# Altium footprint library PcbLib1.PcbLib: 75 footprints (part 4 of 5)
Each footprint in its own frame and in the unit in brackets; x right, y up, seen from the top. Pads: shape width x height; smd on the part's side, far side on the other; paste and mask are expansions set on the pad; w line width, h text height; cw(c..) or ccw(c..) is an arc to the next point about the centre after c.
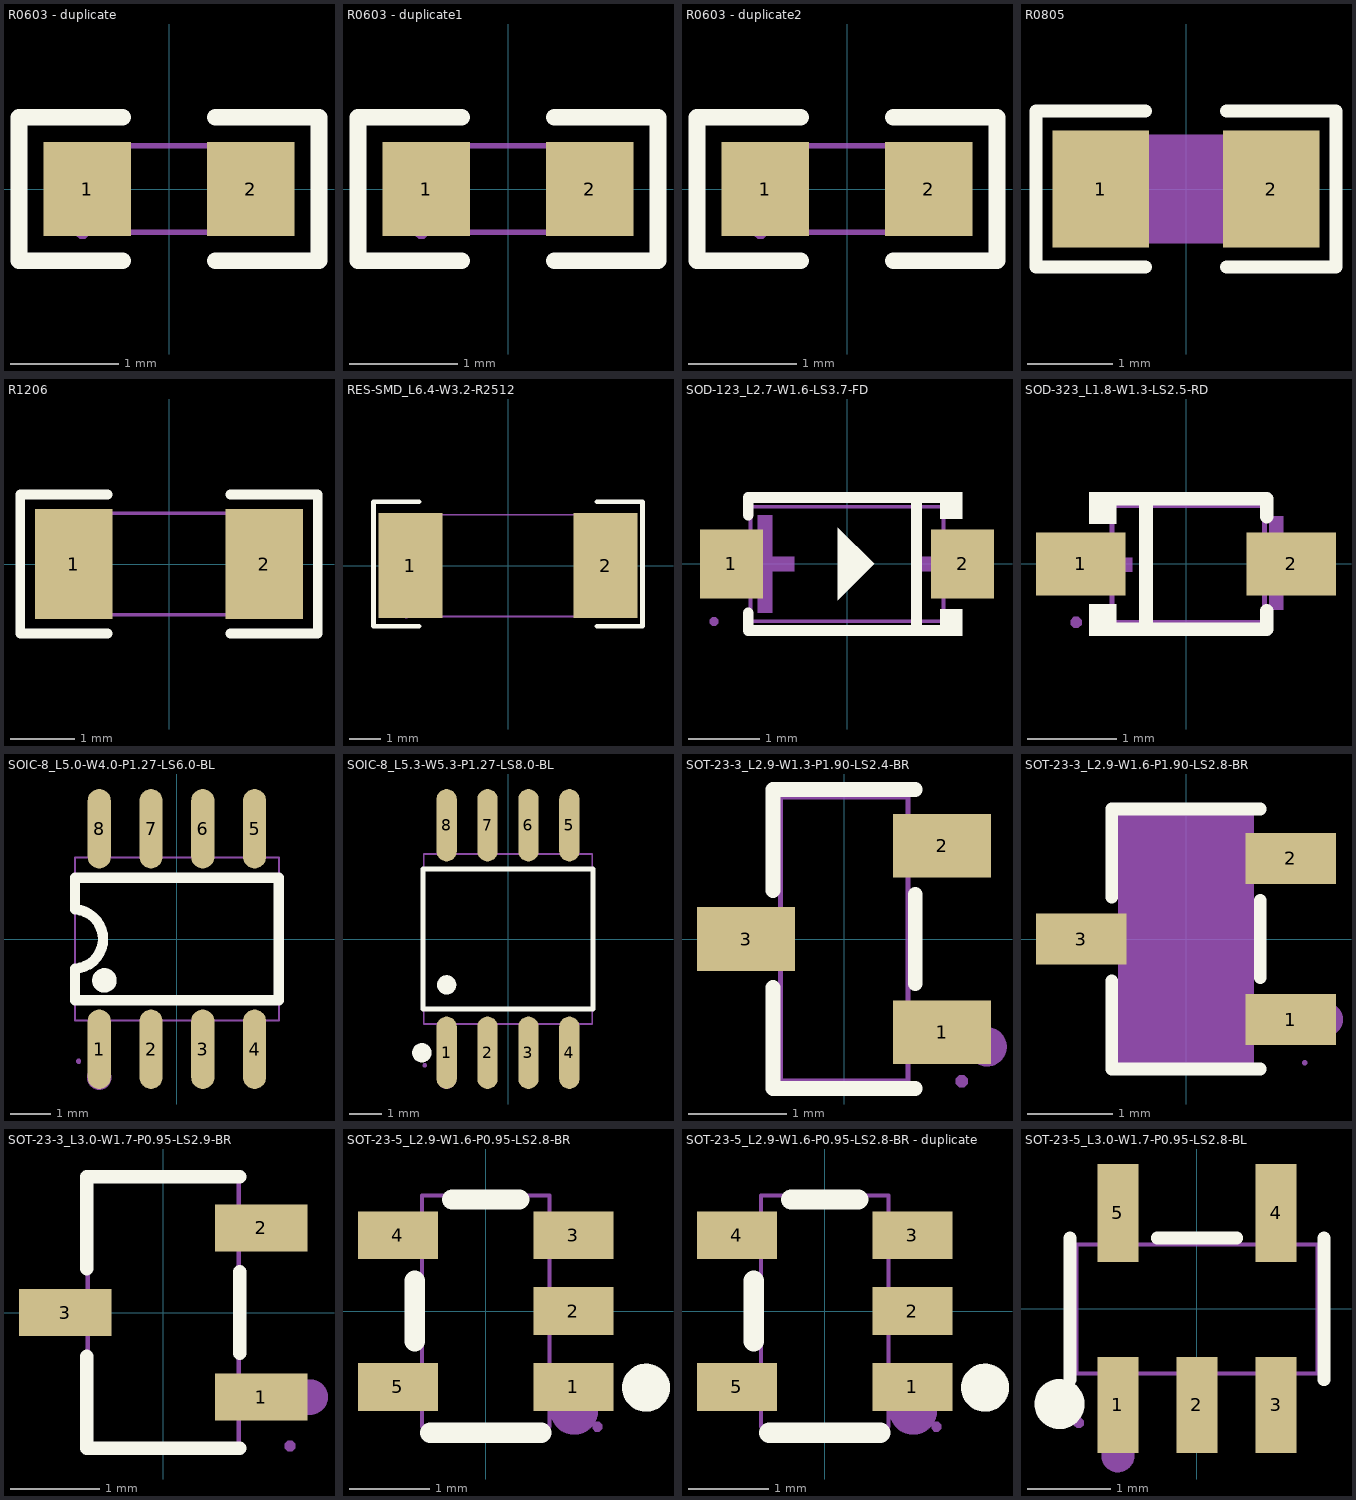
[diagram p3: the footprints below, top view; thin cyan lines are the x and y axes]

## R0603 - duplicate [mm]
pads (2):
  rect 0.806x0.864 smd paste-100 mask+0.051: 1(-0.753,0) 2(0.753,0)
Top Overlay:
  lines w0.152: -0.426,-0.661 -1.385,-0.661 -1.385,0.661 -0.426,0.661 ; 0.426,-0.661 1.385,-0.661 1.385,0.661 0.426,0.661
Top Paste:
  region: 1.195,0.45 0.395,0.45 0.345,0.4 0.345,0.172 0.715,0.172 0.715,-0.158 0.345,-0.158 0.345,-0.4 0.395,-0.45 1.195,-0.45 1.245,-0.4 1.245,0.4
  region: -1.195,-0.45 -0.395,-0.45 -0.345,-0.4 -0.345,-0.172 -0.715,-0.172 -0.715,0.158 -0.345,0.158 -0.345,0.4 -0.395,0.45 -1.195,0.45 -1.245,0.4 -1.245,-0.4
Mechanical 6:
  lines w0.051: -0.8,-0.4 -0.8,0.4 0.8,0.4 0.8,-0.4 -0.8,-0.4
Mechanical 8:
  region: -0.74,-0.4 -0.74,-0.425 -0.775,-0.46 -0.825,-0.46 -0.86,-0.425 -0.86,-0.4 -0.86,-0.375 -0.825,-0.34 -0.775,-0.34 -0.74,-0.375 -0.74,-0.4
Mechanical 9:
  region: -0.8,-0.4 -0.8,0.4 -0.5,0.4 -0.5,-0.4
  region: 0.8,-0.4 0.8,0.4 0.5,0.4 0.5,-0.4

## R0603 - duplicate1 [mm]
pads (2):
  rect 0.806x0.864 smd paste-100 mask+0.051: 1(-0.753,0) 2(0.753,0)
Top Overlay:
  lines w0.152: -0.426,-0.661 -1.385,-0.661 -1.385,0.661 -0.426,0.661 ; 0.426,-0.661 1.385,-0.661 1.385,0.661 0.426,0.661
Top Paste:
  region: -1.195,-0.45 -0.395,-0.45 -0.345,-0.4 -0.345,-0.172 -0.715,-0.172 -0.715,0.158 -0.345,0.158 -0.345,0.4 -0.395,0.45 -1.195,0.45 -1.245,0.4 -1.245,-0.4
  region: 1.195,0.45 0.395,0.45 0.345,0.4 0.345,0.172 0.715,0.172 0.715,-0.158 0.345,-0.158 0.345,-0.4 0.395,-0.45 1.195,-0.45 1.245,-0.4 1.245,0.4
Mechanical 6:
  lines w0.051: -0.8,-0.4 0.8,-0.4 0.8,0.4 -0.8,0.4 -0.8,-0.4
Mechanical 8:
  region: -0.74,-0.4 -0.74,-0.425 -0.775,-0.46 -0.825,-0.46 -0.86,-0.425 -0.86,-0.4 -0.86,-0.375 -0.825,-0.34 -0.775,-0.34 -0.74,-0.375 -0.74,-0.4
Mechanical 9:
  region: 0.8,-0.4 0.8,0.4 0.5,0.4 0.5,-0.4
  region: -0.8,-0.4 -0.8,0.4 -0.5,0.4 -0.5,-0.4

## R0603 - duplicate2 [mm]
pads (2):
  rect 0.806x0.864 smd paste-100 mask+0.051: 1(-0.753,0) 2(0.753,0)
Top Overlay:
  lines w0.152: -0.426,-0.661 -1.385,-0.661 -1.385,0.661 -0.426,0.661 ; 0.426,-0.661 1.385,-0.661 1.385,0.661 0.426,0.661
Top Paste:
  region: 1.195,0.45 0.395,0.45 0.345,0.4 0.345,0.172 0.715,0.172 0.715,-0.158 0.345,-0.158 0.345,-0.4 0.395,-0.45 1.195,-0.45 1.245,-0.4 1.245,0.4
  region: -1.195,-0.45 -0.395,-0.45 -0.345,-0.4 -0.345,-0.172 -0.715,-0.172 -0.715,0.158 -0.345,0.158 -0.345,0.4 -0.395,0.45 -1.195,0.45 -1.245,0.4 -1.245,-0.4
Mechanical 6:
  lines w0.051: -0.8,-0.4 -0.8,0.4 0.8,0.4 0.8,-0.4 -0.8,-0.4
Mechanical 8:
  region: -0.74,-0.4 -0.74,-0.425 -0.775,-0.46 -0.825,-0.46 -0.86,-0.425 -0.86,-0.4 -0.86,-0.375 -0.825,-0.34 -0.775,-0.34 -0.74,-0.375 -0.74,-0.4
Mechanical 9:
  region: -0.8,-0.4 -0.8,0.4 -0.5,0.4 -0.5,-0.4
  region: 0.8,-0.4 0.8,0.4 0.5,0.4 0.5,-0.4

## R0805 [mm]
pads (2):
  rect 1.133x1.377 smd paste-100 mask+0.051: 1(-1,0) 2(1,0)
Top Overlay:
  lines w0.152: -0.476,-0.917 -1.761,-0.917 -1.761,0.917 -0.476,0.917 ; 0.476,-0.917 1.761,-0.917 1.761,0.917 0.476,0.917
Top Paste:
  region: 0.45,-0.64 0.45,-0.22 0.895,-0.22 0.895,0.23 0.455,0.23 0.45,0.64 0.5,0.69 1.65,0.69 1.7,0.64 1.7,-0.64 1.65,-0.69 0.5,-0.69
  region: -1.7,-0.64 -1.7,0.64 -1.65,0.69 -0.5,0.69 -0.45,0.64 -0.445,0.23 -0.895,0.23 -0.895,-0.22 -0.455,-0.22 -0.45,-0.64 -0.5,-0.69 -1.65,-0.69
Mechanical 9:
  region: -1,-0.637 -1,0.637 1,0.637 1,-0.637
Mechanical 11:
  region: -0.97,-0.638 -0.97,-0.65 -0.988,-0.668 -1.012,-0.668 -1.03,-0.65 -1.03,-0.638 -1.03,-0.625 -1.012,-0.608 -0.988,-0.608 -0.97,-0.625 -0.97,-0.638
Mechanical 12:
  region: 1,-0.637 1,0.637 0.6,0.637 0.6,-0.637
  region: -1,-0.637 -1,0.637 -0.6,0.637 -0.6,-0.637

## R1206 [mm]
pads (2):
  rect 1.208x1.701 smd paste-100 mask+0.051: 1(-1.479,0) 2(1.479,0)
Top Overlay:
  lines w0.152: -0.951,-1.079 -2.311,-1.079 -2.311,1.079 -0.951,1.079 ; 0.951,-1.079 2.311,-1.079 2.311,1.079 0.951,1.079
Top Paste:
  region: 0.875,-0.75 0.875,-0.389 0.975,-0.289 1.186,-0.289 1.286,-0.189 1.286,0.189 1.186,0.289 0.975,0.289 0.875,0.389 0.875,0.75 0.975,0.85 1.983,0.85 2.083,0.75 2.083,-0.75 1.983,-0.85 0.975,-0.85
  region: -0.875,-0.75 -0.875,-0.389 -0.975,-0.289 -1.186,-0.289 -1.286,-0.189 -1.286,0.189 -1.186,0.289 -0.975,0.289 -0.875,0.389 -0.875,0.75 -0.975,0.85 -1.983,0.85 -2.083,0.75 -2.083,-0.75 -1.983,-0.85 -0.975,-0.85
Mechanical 6:
  lines w0.051: -1.55,-0.788 -1.55,0.788 1.55,0.788 1.55,-0.788 -1.55,-0.788
Mechanical 8:
  region: -1.49,-0.787 -1.49,-0.812 -1.525,-0.847 -1.575,-0.847 -1.61,-0.812 -1.61,-0.787 -1.61,-0.763 -1.575,-0.727 -1.525,-0.727 -1.49,-0.763 -1.49,-0.787
Mechanical 9:
  region: -1.55,-0.788 -1.55,0.788 -1.1,0.788 -1.1,-0.788
  region: 1.55,-0.788 1.55,0.788 1.1,0.788 1.1,-0.788

## RES-SMD_L6.4-W3.2-R2512 [mm]
pads (2):
  rect 2x3.3 smd: 1(-3.066,0) 2(3.066,0)
Top Overlay:
  lines w0.152: -2.794,-1.905 -4.229,-1.905 -4.229,2.008 -2.794,2.008 ; 2.794,-1.905 4.229,-1.905 4.229,2.008 2.794,2.008
Mechanical 6:
  lines w0.051: -3.2,-1.6 -3.2,1.6 3.2,1.6 3.2,-1.6 -3.2,-1.6
Mechanical 8:
  region: -3.14,-1.6 -3.14,-1.625 -3.175,-1.66 -3.225,-1.66 -3.26,-1.625 -3.26,-1.6 -3.26,-1.575 -3.225,-1.54 -3.175,-1.54 -3.14,-1.575 -3.14,-1.6
Mechanical 9:
  region: -3.199,1.6 -2.299,1.6 -2.299,-1.6 -3.199,-1.6
  region: 2.299,1.6 3.199,1.6 3.199,-1.6 2.299,-1.6

## SOD-123_L2.7-W1.6-LS3.7-FD [mm]
pads (2):
  rect 0.88x0.96 smd: 1(-1.61,0) 2(1.61,0)
Top Overlay:
  region: 0.381,0 -0.127,0.508 -0.127,-0.508
  region: 1.3,1.002 1.3,0.632 1.605,0.632 1.605,1.002
  region: 1.3,-1.003 1.3,-0.632 1.605,-0.633 1.605,-1.003
  lines w0.152: -1.376,-0.683 -1.376,-0.926 1.376,-0.926 ; -1.376,0.683 -1.376,0.926 1.376,0.926 ; 0.967,-0.926 0.967,0.926
Mechanical 2:
  region: -1.245,-0.68 -1.245,0.68 -1.041,0.68 -1.041,-0.68
  region: -1.551,-0.102 -1.551,0.102 -0.735,0.102 -0.735,-0.102
  region: 1.805,-0.102 1.805,0.102 0.989,0.102 0.989,-0.102
Mechanical 6:
  lines w0.051: -1.345,-0.8 -1.345,0.8 1.345,0.8 1.345,-0.8 -1.345,-0.8
Mechanical 7:
  region: -1.511,0.3 -1.511,-0.3 -1.34,-0.3 -1.34,0.3
  region: 1.511,-0.3 1.511,0.3 1.34,0.3 1.34,-0.3
Mechanical 8:
  region: -1.791,-0.8 -1.791,-0.825 -1.826,-0.86 -1.876,-0.86 -1.911,-0.825 -1.911,-0.8 -1.911,-0.775 -1.876,-0.74 -1.826,-0.74 -1.791,-0.775 -1.791,-0.8
Mechanical 9:
  region: -1.851,0.3 -1.501,0.3 -1.501,-0.3 -1.851,-0.3
  region: 1.851,-0.3 1.501,-0.3 1.501,0.3 1.851,0.3

## SOD-323_L1.8-W1.3-LS2.5-RD [mm]
pads (2):
  rect 1x0.7 smd: 1(-1.172,0) 2(1.172,0)
Top Overlay:
  region: -0.775,0.802 -0.775,0.45 -1.08,0.45 -1.08,0.802
  region: -0.775,-0.803 -0.775,-0.45 -1.08,-0.45 -1.08,-0.803
  lines w0.152: -0.851,-0.726 0.901,-0.726 0.901,-0.52 ; -0.851,0.726 0.901,0.726 0.901,0.53 ; -0.447,-0.726 -0.447,0.726
Mechanical 2:
  region: -1.225,0.07 -1.225,-0.086 -0.601,-0.086 -0.601,0.07
  region: 1.315,0.09 1.315,-0.066 0.691,-0.066 0.691,0.09
  region: 1.083,0.53 1.083,-0.51 0.927,-0.51 0.927,0.53
Mechanical 6:
  lines w0.051: -0.825,-0.65 -0.825,0.65 0.875,0.65 0.875,-0.65 -0.825,-0.65
Mechanical 7:
  region: 0.985,0.16 0.985,-0.16 0.865,-0.16 0.865,0.16
  region: -0.815,0.16 -0.815,-0.16 -0.935,-0.16 -0.935,0.16
Mechanical 8:
  region: -1.165,-0.65 -1.165,-0.675 -1.2,-0.71 -1.25,-0.71 -1.285,-0.675 -1.285,-0.65 -1.285,-0.625 -1.25,-0.59 -1.2,-0.59 -1.165,-0.625 -1.165,-0.65
Mechanical 9:
  region: 1.275,0.16 1.275,-0.16 0.975,-0.16 0.975,0.16
  region: -0.925,0.16 -0.925,-0.16 -1.225,-0.16 -1.225,0.16

## SOIC-8_L5.0-W4.0-P1.27-LS6.0-BL [mil]
pads (8):
  oval 22.38x76.78 smd: 1(-75,-106.5) 2(-25,-106.5) 3(25,-106.5) 4(75,-106.5) 5(75,106.5) 6(25,106.5) 7(-25,106.5) 8(-75,106.5)
Top Overlay:
  circle w11.81: c-70,-40 r5.91
  lines w10: -98.43,-28.61 ccw(c-99.99,0) -98.23,28.59 ; -98.42,-28.61 -98.42,-59.05 98.42,-59.05 98.42,59.05 -98.42,59.05 -98.42,28.59
Mechanical 2:
  circle w11.81: c-75,-133.86 r5.91
Mechanical 6:
  lines w2: -98.42,-78.74 98.42,-78.74 98.42,78.74 -98.42,78.74 -98.42,-78.74
Mechanical 7:
  region: -83.07,-85.63 -83.07,-76.38 -66.93,-76.38 -66.93,-85.63
  region: -33.07,-85.63 -33.07,-76.38 -16.93,-76.38 -16.93,-85.63
  region: 16.93,-85.63 16.93,-76.38 33.07,-76.38 33.07,-85.63
  region: 66.93,-85.63 66.93,-76.38 83.07,-76.38 83.07,-85.63
  region: -83.07,76.38 -83.07,85.63 -66.93,85.63 -66.93,76.38
  region: -33.07,76.38 -33.07,85.63 -16.93,85.63 -16.93,76.38
  region: 16.93,76.38 16.93,85.63 33.07,85.63 33.07,76.38
  region: 66.93,76.38 66.93,85.63 83.07,85.63 83.07,76.38
Mechanical 8:
  region: -92.64,-118.11 -92.64,-119.09 -94.02,-120.47 -95.98,-120.47 -97.36,-119.09 -97.36,-118.11 -97.36,-117.13 -95.98,-115.75 -94.02,-115.75 -92.64,-117.13 -92.64,-118.11
Mechanical 9:
  region: -83.07,-118.11 -83.07,-85.24 -66.93,-85.24 -66.93,-118.11
  region: -33.07,-118.11 -33.07,-85.24 -16.93,-85.24 -16.93,-118.11
  region: 16.93,-118.11 16.93,-85.24 33.07,-85.24 33.07,-118.11
  region: 66.93,-118.11 66.93,-85.24 83.07,-85.24 83.07,-118.11
  region: -83.07,85.24 -83.07,118.11 -66.93,118.11 -66.93,85.24
  region: -33.07,85.24 -33.07,118.11 -16.93,118.11 -16.93,85.24
  region: 16.93,85.24 16.93,118.11 33.07,118.11 33.07,85.24
  region: 66.93,85.24 66.93,118.11 83.07,118.11 83.07,85.24

## SOIC-8_L5.3-W5.3-P1.27-LS8.0-BL [mm]
pads (8):
  oval 0.63x2.25 smd: 1(-1.905,-3.53) 2(-0.635,-3.53) 3(0.635,-3.53) 4(1.905,-3.53) 5(1.905,3.53) 6(0.635,3.53) 7(-0.635,3.53) 8(-1.905,3.53)
Top Overlay:
  circle w0.3: c-2.672,-3.53 r0.15
  circle w0.3: c-1.905,-1.424 r0.15
  lines w0.152: -2.639,-2.176 2.639,-2.176 2.639,2.176 -2.639,2.176 -2.639,-2.176
Mechanical 2:
  circle w0.3: c-1.905,-4.35 r0.15
Mechanical 6:
  lines w0.051: -2.615,-2.64 2.615,-2.64 2.615,2.64 -2.615,2.64 -2.615,-2.64
Mechanical 7:
  region: 1.68,3.31 1.68,2.595 2.13,2.595 2.13,3.31
  region: 0.41,3.31 0.41,2.595 0.86,2.595 0.86,3.31
  region: -0.86,3.31 -0.86,2.595 -0.41,2.595 -0.41,3.31
  region: -2.13,3.31 -2.13,2.595 -1.68,2.595 -1.68,3.31
  region: 1.68,-3.31 1.68,-2.595 2.13,-2.595 2.13,-3.31
  region: 0.41,-3.31 0.41,-2.595 0.86,-2.595 0.86,-3.31
  region: -0.86,-3.31 -0.86,-2.595 -0.41,-2.595 -0.41,-3.31
  region: -2.13,-3.31 -2.13,-2.595 -1.68,-2.595 -1.68,-3.31
Mechanical 8:
  region: -2.525,-3.92 -2.525,-3.945 -2.56,-3.98 -2.61,-3.98 -2.645,-3.945 -2.645,-3.92 -2.645,-3.895 -2.61,-3.86 -2.56,-3.86 -2.525,-3.895 -2.525,-3.92
Mechanical 9:
  region: 1.68,3.95 1.68,3.3 2.13,3.3 2.13,3.95
  region: 0.41,3.95 0.41,3.3 0.86,3.3 0.86,3.95
  region: -0.86,3.95 -0.86,3.3 -0.41,3.3 -0.41,3.95
  region: -2.13,3.95 -2.13,3.3 -1.68,3.3 -1.68,3.95
  region: 1.68,-3.95 1.68,-3.3 2.13,-3.3 2.13,-3.95
  region: 0.41,-3.95 0.41,-3.3 0.86,-3.3 0.86,-3.95
  region: -0.86,-3.95 -0.86,-3.3 -0.41,-3.3 -0.41,-3.95
  region: -2.13,-3.95 -2.13,-3.3 -1.68,-3.3 -1.68,-3.95

## SOT-23-3_L2.9-W1.3-P1.90-LS2.4-BR [mm]
pads (3):
  rect 1x0.65 smd: 1(1,-0.95) 2(1,0.95) 3(-1,0)
Top Overlay:
  lines w0.152: -0.726,-0.495 -0.726,-1.526 0.726,-1.526 ; -0.726,0.495 -0.726,1.526 0.726,1.526 ; 0.726,-0.455 0.726,0.455
Mechanical 2:
  circle w0.2: c1.46,-1.1 r0.1
Mechanical 6:
  lines w0.051: -0.65,-1.45 -0.65,1.45 0.65,1.45 0.65,-1.45 -0.65,-1.45
Mechanical 7:
  region: 0.64,0.735 0.64,1.165 0.91,1.165 0.91,0.735
  region: 0.64,-1.165 0.64,-0.735 0.91,-0.735 0.91,-1.165
  region: -0.91,-0.215 -0.91,0.215 -0.64,0.215 -0.64,-0.215
Mechanical 8:
  region: 1.26,-1.45 1.26,-1.475 1.225,-1.51 1.175,-1.51 1.14,-1.475 1.14,-1.45 1.14,-1.425 1.175,-1.39 1.225,-1.39 1.26,-1.425 1.26,-1.45
Mechanical 9:
  region: 0.9,0.735 0.9,1.165 1.2,1.165 1.2,0.735
  region: 0.9,-1.165 0.9,-0.735 1.2,-0.735 1.2,-1.165
  region: -1.2,-0.215 -1.2,0.215 -0.9,0.215 -0.9,-0.215

## SOT-23-3_L2.9-W1.6-P1.90-LS2.8-BR [mm]
pads (3):
  rect 1.07x0.6 smd paste+0 mask+0.051: 1(1.235,-0.95) 2(1.235,0.95) 3(-1.235,0)
Top Overlay:
  lines w0.152: -0.876,-0.495 -0.876,-1.536 0.876,-1.536 ; -0.876,0.495 -0.876,1.536 0.876,1.536 ; 0.876,-0.455 0.876,0.455
Mechanical 5:
  circle w0.2: c1.651,-0.95 r0.1
Mechanical 9:
  region: -0.8,-1.46 -0.8,1.46 0.8,1.46 0.8,-1.46
Mechanical 10:
  region: 0.79,-1.15 0.79,-0.75 0.96,-0.75 0.96,-1.15
  region: 0.79,0.75 0.79,1.15 0.96,1.15 0.96,0.75
  region: -0.96,-0.2 -0.96,0.2 -0.79,0.2 -0.79,-0.2
Mechanical 11:
  region: 1.43,-1.46 1.43,-1.472 1.412,-1.49 1.388,-1.49 1.37,-1.472 1.37,-1.46 1.37,-1.448 1.388,-1.43 1.412,-1.43 1.43,-1.448 1.43,-1.46
Mechanical 12:
  region: 0.95,-1.15 0.95,-0.75 1.4,-0.75 1.4,-1.15
  region: 0.95,0.75 0.95,1.15 1.4,1.15 1.4,0.75
  region: -0.95,-0.2 -0.95,0.2 -1.4,0.2 -1.4,-0.2

## SOT-23-3_L3.0-W1.7-P0.95-LS2.9-BR [mm]
pads (3):
  rect 1.037x0.532 smd: 1(1.101,-0.95) 2(1.101,0.95) 3(-1.101,0)
Top Overlay:
  lines w0.152: -0.859,-0.495 -0.859,-1.526 0.859,-1.526 ; -0.859,0.495 -0.859,1.526 0.859,1.526 ; 0.859,-0.455 0.859,0.455
Mechanical 2:
  circle w0.2: c1.65,-0.95 r0.1
Mechanical 6:
  lines w0.051: -0.85,-1.5 -0.85,1.5 0.85,1.5 0.85,-1.5 -0.85,-1.5
Mechanical 7:
  region: 0.815,-1.137 0.815,-0.762 1.01,-0.762 1.01,-1.137
  region: 0.815,0.762 0.815,1.137 1.01,1.137 1.01,0.762
  region: -1.01,-0.188 -1.01,0.188 -0.815,0.188 -0.815,-0.188
Mechanical 8:
  region: 1.485,-1.5 1.485,-1.525 1.45,-1.56 1.4,-1.56 1.365,-1.525 1.365,-1.5 1.365,-1.475 1.4,-1.44 1.45,-1.44 1.485,-1.475 1.485,-1.5
Mechanical 9:
  region: 1,-1.137 1,-0.762 1.425,-0.762 1.425,-1.137
  region: 1,0.762 1,1.137 1.425,1.137 1.425,0.762
  region: -1.425,-0.188 -1.425,0.188 -1,0.188 -1,-0.188

## SOT-23-5_L2.9-W1.6-P0.95-LS2.8-BR [mm]
pads (5):
  rect 1x0.6 smd paste+0 mask+0.05: 1(1.1,-0.95) 2(1.1,0) 3(1.1,0.95) 4(-1.1,0.95) 5(-1.1,-0.95)
Top Overlay:
  circle w0.3: c2.01,-0.96 r0.15
  lines w0.254: -0.889,-0.381 -0.889,0.381 ; -0.699,-1.524 0.698,-1.524 ; -0.422,1.397 0.422,1.397
Mechanical 2:
  circle w0.3: c1.11,-1.25 r0.15
Mechanical 6:
  lines w0.051: -0.8,-1.45 -0.8,1.45 0.8,1.45 0.8,-1.45 -0.8,-1.45
Mechanical 7:
  region: 0.96,-0.2 0.79,-0.2 0.79,0.2 0.96,0.2
  region: 0.96,0.75 0.79,0.75 0.79,1.15 0.96,1.15
  region: 0.96,-1.15 0.79,-1.15 0.79,-0.75 0.96,-0.75
  region: -0.79,0.75 -0.96,0.75 -0.96,1.15 -0.79,1.15
  region: -0.79,-1.15 -0.96,-1.15 -0.96,-0.75 -0.79,-0.75
Mechanical 8:
  region: 1.46,-1.45 1.46,-1.475 1.425,-1.51 1.375,-1.51 1.34,-1.475 1.34,-1.45 1.34,-1.425 1.375,-1.39 1.425,-1.39 1.46,-1.425 1.46,-1.45
Mechanical 9:
  region: 1.4,-0.2 0.95,-0.2 0.95,0.2 1.4,0.2
  region: 1.4,0.75 0.95,0.75 0.95,1.15 1.4,1.15
  region: 1.4,-1.15 0.95,-1.15 0.95,-0.75 1.4,-0.75
  region: -0.95,0.75 -1.4,0.75 -1.4,1.15 -0.95,1.15
  region: -0.95,-1.15 -1.4,-1.15 -1.4,-0.75 -0.95,-0.75

## SOT-23-5_L2.9-W1.6-P0.95-LS2.8-BR - duplicate [mm]
pads (5):
  rect 1x0.6 smd paste+0 mask+0.05: 1(1.1,-0.95) 2(1.1,0) 3(1.1,0.95) 4(-1.1,0.95) 5(-1.1,-0.95)
Top Overlay:
  circle w0.3: c2.01,-0.96 r0.15
  lines w0.254: -0.889,-0.381 -0.889,0.381 ; -0.699,-1.524 0.698,-1.524 ; -0.422,1.397 0.422,1.397
Mechanical 2:
  circle w0.3: c1.11,-1.25 r0.15
Mechanical 6:
  lines w0.051: -0.8,-1.45 0.8,-1.45 0.8,1.45 -0.8,1.45 -0.8,-1.45
Mechanical 7:
  region: -0.79,-1.15 -0.96,-1.15 -0.96,-0.75 -0.79,-0.75
  region: -0.79,0.75 -0.96,0.75 -0.96,1.15 -0.79,1.15
  region: 0.96,-1.15 0.79,-1.15 0.79,-0.75 0.96,-0.75
  region: 0.96,0.75 0.79,0.75 0.79,1.15 0.96,1.15
  region: 0.96,-0.2 0.79,-0.2 0.79,0.2 0.96,0.2
Mechanical 8:
  region: 1.46,-1.45 1.46,-1.475 1.425,-1.51 1.375,-1.51 1.34,-1.475 1.34,-1.45 1.34,-1.425 1.375,-1.39 1.425,-1.39 1.46,-1.425 1.46,-1.45
Mechanical 9:
  region: -0.95,-1.15 -1.4,-1.15 -1.4,-0.75 -0.95,-0.75
  region: -0.95,0.75 -1.4,0.75 -1.4,1.15 -0.95,1.15
  region: 1.4,-1.15 0.95,-1.15 0.95,-0.75 1.4,-0.75
  region: 1.4,0.75 0.95,0.75 0.95,1.15 1.4,1.15
  region: 1.4,-0.2 0.95,-0.2 0.95,0.2 1.4,0.2

## SOT-23-5_L3.0-W1.7-P0.95-LS2.8-BL [mm]
pads (5):
  rect 0.49x1.157 smd: 1(-0.95,-1.154) 2(0,-1.154) 3(0.95,-1.154)
  rect 0.49x1.175 smd: 4(0.95,1.154) 5(-0.95,1.154)
Top Overlay:
  circle w0.3: c-1.651,-1.143 r0.15
  lines w0.152: -1.526,-0.851 -1.526,0.851 ; -0.476,0.851 0.476,0.851 ; 1.526,-0.851 1.526,0.851
Mechanical 2:
  circle w0.2: c-0.95,-1.763 r0.1
Mechanical 6:
  lines w0.051: -1.45,-0.775 -1.45,0.775 1.45,0.775 1.45,-0.775 -1.45,-0.775
Mechanical 7:
  region: -1.125,-1.01 -1.125,-0.74 -0.775,-0.74 -0.775,-1.01
  region: -0.175,-1.01 -0.175,-0.74 0.175,-0.74 0.175,-1.01
  region: 0.775,-1.01 0.775,-0.74 1.125,-0.74 1.125,-1.01
  region: 0.775,0.74 0.775,1.01 1.125,1.01 1.125,0.74
  region: -1.125,0.74 -1.125,1.01 -0.775,1.01 -0.775,0.74
Mechanical 8:
  region: -1.36,-1.37 -1.36,-1.395 -1.395,-1.43 -1.445,-1.43 -1.48,-1.395 -1.48,-1.37 -1.48,-1.345 -1.445,-1.31 -1.395,-1.31 -1.36,-1.345 -1.36,-1.37
Mechanical 9:
  region: -1.125,-1.4 -1.125,-1 -0.775,-1 -0.775,-1.4
  region: -0.175,-1.4 -0.175,-1 0.175,-1 0.175,-1.4
  region: 0.775,-1.4 0.775,-1 1.125,-1 1.125,-1.4
  region: 0.775,1 0.775,1.4 1.125,1.4 1.125,1
  region: -1.125,1 -1.125,1.4 -0.775,1.4 -0.775,1